# Altium footprint library FootPrintLib_10.PcbLib: 270 footprints (part 10 of 17)
Each footprint in its own frame and in the unit in brackets; x right, y up, seen from the top. Pads: shape width x height; smd on the part's side, far side on the other; paste and mask are expansions set on the pad; w line width, h text height; cw(c..) or ccw(c..) is an arc to the next point about the centre after c.
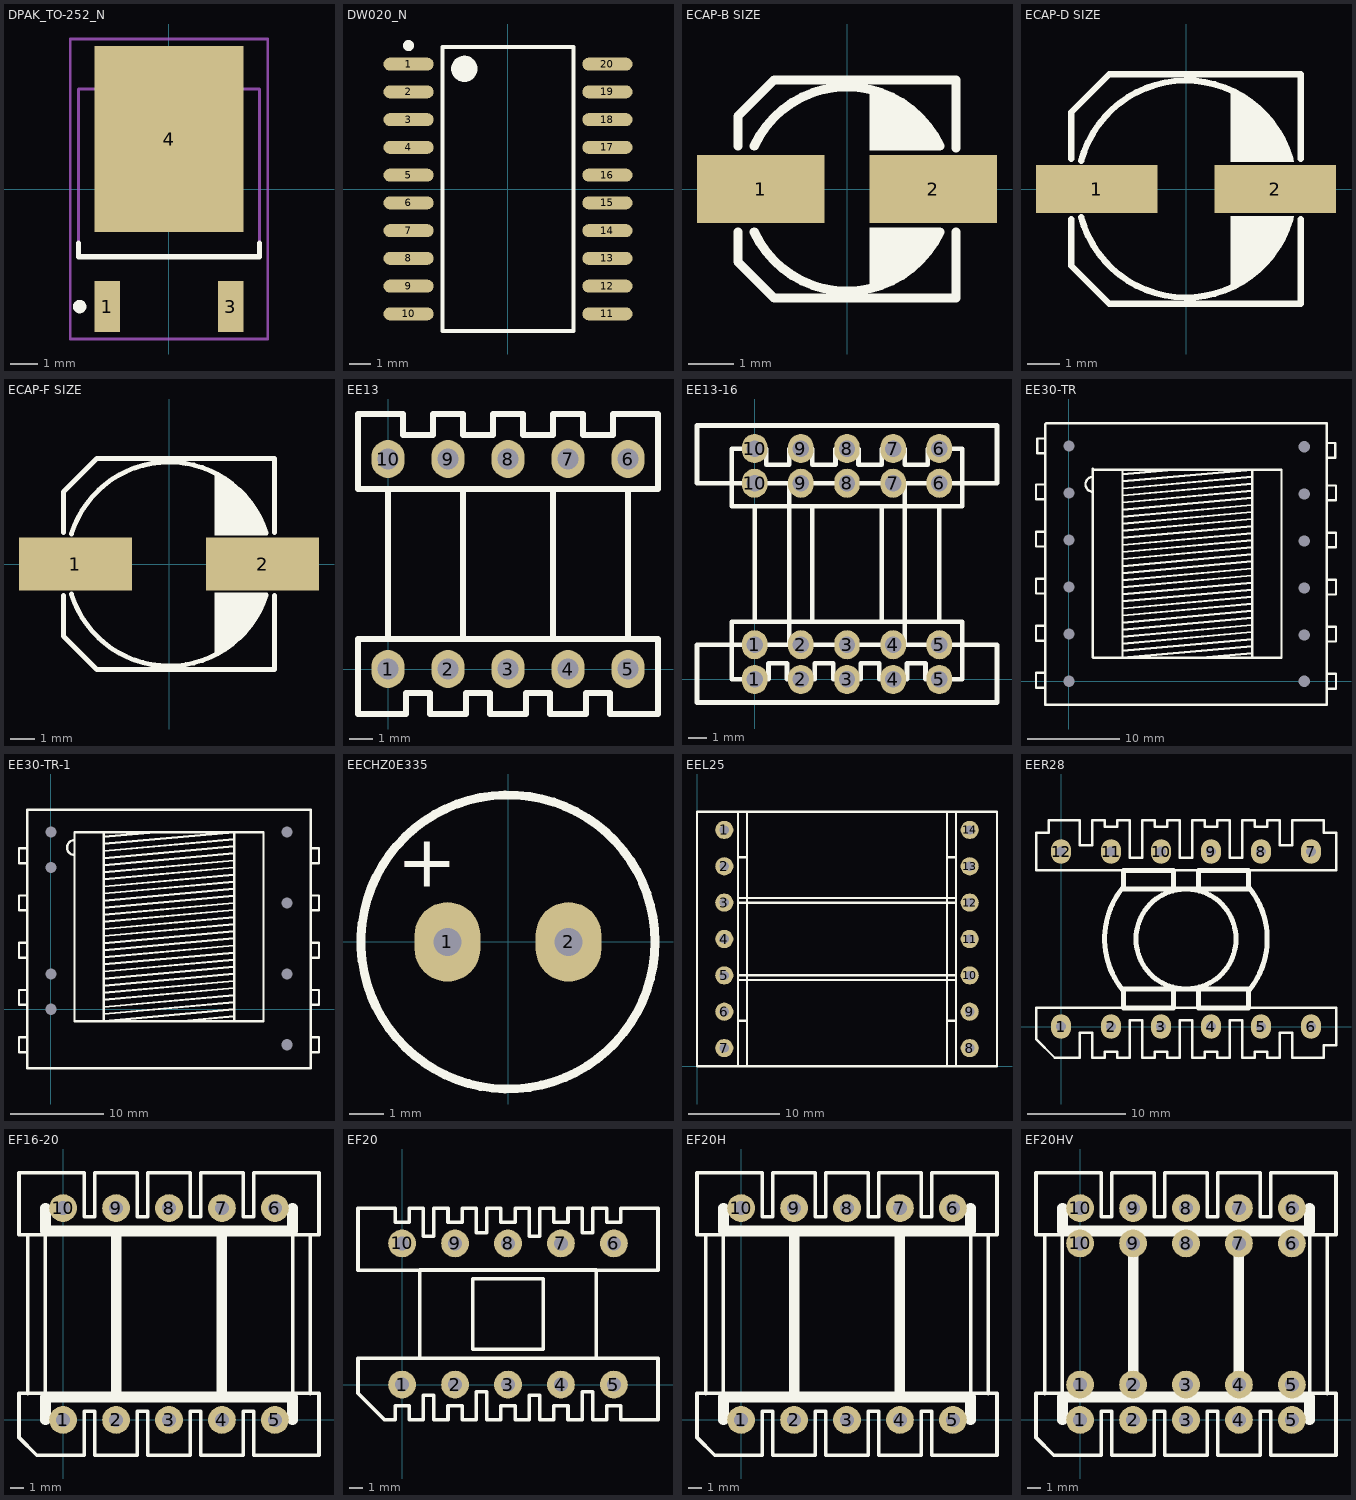
[diagram p9: the footprints below, top view; thin cyan lines are the x and y axes]

## DPAK_TO-252_N [mm] "D-PAK, 4-Leads, Body 6.1x6.6mm, Pitch 2.29mm, Lead Span 9.7mm, IPC Medium Density"
height 2.38
pads (3):
  rect 0.95x1.9 smd: 1(-2.28,-4.35) 3(2.28,-4.35)
  rect 5.5x6.9 smd: 4(0,1.85)
Top Overlay:
  circle w0.25: c-3.305,-4.35 r0.125
  lines w0.2: -3.35,-2 -3.35,-2.5 3.35,-2.5 3.35,-2
Mechanical 13:
  lines w0.1: -3.35,-2.5 -3.35,3.7 3.35,3.7 3.35,-2.5 -3.35,-2.5
Mechanical 15:
  lines w0.1: -0.5,0 0.5,0 ; 0,-0.5 0,0.5 ; -3.65,-5.55 -3.65,5.55 3.65,5.55 3.65,-5.55 -3.65,-5.55
3D body "DPAK.STEP": height 2.34, standoff -0.07, extent -3.27,-5.176 3.27,4.763

## DW020_N [mm] "SOIC, 20-Leads, Body 12.8x7.5mm, Pitch 1.27mm, IPC Medium Density"
height 2.65
pads (20):
  oval 2.3x0.6 smd: 1(-4.55,5.715) 2(-4.55,4.445) 3(-4.55,3.175) 4(-4.55,1.905) 5(-4.55,0.635) 6(-4.55,-0.635) 7(-4.55,-1.905) 8(-4.55,-3.175) 9(-4.55,-4.445) 10(-4.55,-5.715) 11(4.55,-5.715) 12(4.55,-4.445) 13(4.55,-3.175) 14(4.55,-1.905) 15(4.55,-0.635) 16(4.55,0.635) 17(4.55,1.905) 18(4.55,3.175) 19(4.55,4.445) 20(4.55,5.715)
Top Overlay:
  circle w0.25: c-4.55,6.565 r0.125
  circle w0.6: c-2,5.5 r0.3
  lines w0.2: -3,-6.5 -3,6.5 3,6.5 3,-6.5 -3,-6.5

## ECAP-B SIZE [mm] "Footprint For Panasonic Co."
pads (2):
  rect 2.8x1.5 smd mask+0.1: 1(-1.9,0) 2(1.9,0)
Top Overlay:
  region: 2.05,-0.85 2.05,-1.05 1.1,-2 0.5,-2.25 0.5,-0.85
  region: 2.05,0.85 2.05,1.05 1.1,2 0.5,2.25 0.5,0.85
  lines w0.2: -2.4,-0.95 -2.4,-1.6 -1.6,-2.4 2.4,-2.4 2.4,-0.95 ; -2.4,0.95 -2.4,1.6 -1.6,2.4 2.4,2.4 2.4,0.9 ; -2.04,-0.949 ccw(c0,0) 2.04,-0.949 ; -2.04,0.949 cw(c0,0) 2.04,0.949
3D body "ea-B.STEP": height 5.41, standoff -0.01, extent -2.286,-2.15 2.314,2.15

## ECAP-D SIZE [mm] "Footprint For Panasonic Co."
pads (2):
  rect 3.8x1.5 smd mask+0.1: 1(-2.8,0) 2(2.8,0)
Top Overlay:
  region: 3.38,0.85 3.35,1 2.11,2.78 1.4,3.11 1.4,0.85
  region: 3.38,-0.85 3.35,-1 2.11,-2.78 1.4,-3.11 1.4,-0.85
  lines w0.2: -3.6,-0.95 -3.6,-2.4 -2.4,-3.6 3.6,-3.6 3.6,-0.95 ; -3.6,0.95 -3.6,2.4 -2.4,3.6 3.6,3.6 3.6,0.95 ; -3.284,-0.88 ccw(c0,0) 3.267,-0.941 ; -3.284,0.88 cw(c0,0) 3.267,0.941
3D body "ea-D.STEP": height 5.41, standoff -0.01, extent -3.514,-3.259 3.486,3.341

## ECAP-F SIZE [mm] "Footprint For Panasonic Co."
height 10.2
pads (2):
  rect 4.7x2.2 smd mask+0.1: 1(-3.9,0) 2(3.9,0)
Top Overlay:
  region: 4.1,1.2 4.1,1.3 2.91,3.18 1.9,3.8 1.9,1.2
  region: 4.1,-1.2 4.1,-1.3 2.91,-3.18 1.9,-3.8 1.9,-1.2
  lines w0.2: -4.4,-1.3 -4.4,-3 -3,-4.4 4.4,-4.4 4.4,-1.3 ; -4.4,1.3 -4.4,3 -3,4.4 ; -4.064,-1.243 ccw(c0,0) 4.051,-1.285 ; -4.064,1.243 cw(c0,0) 4.051,1.285 ; 4.4,1.3 4.4,4.4 -3,4.4 ; -3,4.4 -3,4.4
3D body "EA-F.STEP": height 10.21, standoff -0.01, extent -4.95,-4.109 4.95,4.191

## EE13 [mm]
pads (10):
  oval 1.4x1.6 hole 0.9: 1(0,0) 2(2.54,0) 3(5.08,0) 4(7.62,0) 5(10.16,0) 6(10.16,8.89) 7(7.62,8.89) 8(5.08,8.89) 9(2.54,8.89) 10(0,8.89)
Top Overlay:
  lines w0.254: 0,1.27 0,7.62 ; 3.175,1.27 3.175,7.62 ; 6.985,1.27 6.985,7.62 ; 10.16,1.27 10.16,7.62 ; -1.27,-1.905 -1.27,1.27 11.43,1.27 11.43,-1.905 9.398,-1.905 9.398,-1.016 8.382,-1.016 8.382,-1.905 6.858,-1.905 6.858,-1.016 5.842,-1.016 5.842,-1.905 4.318,-1.905 4.318,-1.016 3.302,-1.016 3.302,-1.905 1.778,-1.905 1.778,-1.016 0.762,-1.016 0.762,-1.905 -1.27,-1.905 ; -1.27,7.62 11.43,7.62 11.43,10.795 9.525,10.795 9.525,9.906 8.255,9.906 8.255,10.795 6.985,10.795 6.985,9.906 5.715,9.906 5.715,10.795 4.445,10.795 4.445,9.906 3.175,9.906 3.175,10.795 1.905,10.795 1.905,9.906 0.635,9.906 0.635,10.795 -1.27,10.795 -1.27,7.62

## EE13-16 [mm]
pads (20):
  oval 1.4x1.6 hole 0.9: 1(0,0) 1(0,1.905) 2(2.54,0) 2(2.54,1.905) 3(5.08,0) 3(5.08,1.905) 4(7.62,0) 4(7.62,1.905) 5(10.16,0) 5(10.16,1.905) 6(10.16,10.795) 6(10.16,12.7) 7(7.62,10.795) 7(7.62,12.7) 8(5.08,10.795) 8(5.08,12.7) 9(2.54,10.795) 9(2.54,12.7) 10(0,10.795) 10(0,12.7)
Top Overlay:
  lines w0.254: 0,3.175 0,9.525 ; 1.905,1.905 1.905,10.795 ; 3.175,3.175 3.175,9.525 ; 6.985,3.175 6.985,9.525 ; 8.255,1.905 8.255,10.795 ; 10.16,3.175 10.16,9.525 ; -3.175,-1.27 -3.175,1.905 13.335,1.905 13.335,-1.27 -3.175,-1.27 ; -3.175,10.795 -3.175,13.97 13.335,13.97 13.335,10.795 -3.175,10.795 ; -1.27,0 0.762,0 0.762,0.889 1.778,0.889 1.778,0 3.302,0 3.302,0.889 4.318,0.889 4.318,0 5.842,0 5.842,0.889 6.858,0.889 6.858,0 8.382,0 8.382,0.889 9.398,0.889 9.398,0 11.43,0 11.43,3.175 -1.27,3.175 -1.27,0 ; -1.27,9.525 -1.27,12.7 0.635,12.7 0.635,11.811 1.905,11.811 1.905,12.7 3.175,12.7 3.175,11.811 4.445,11.811 4.445,12.7 5.715,12.7 5.715,11.811 6.985,11.811 6.985,12.7 8.255,12.7 8.255,11.811 9.525,11.811 9.525,12.7 11.43,12.7 11.43,9.525 -1.27,9.525

## EE30-TR [mm] "PDL-851 Trance"
height 22.5
pads (12):
  round 0 / inner round 0 / far side oval 3.2x2.7 hole 1.2: 1(25.4,25.298) 2(25.4,20.218) 3(25.4,15.138) 4(25.4,10.058) 5(25.4,4.978) 6(25.4,0) 7(0,0) 8(0,5.08) 9(0,10.16) 10(0,15.24) 11(0,20.32) 12(0,25.4)
Top Overlay:
  lines w0.254: -2.667,-0.698 -3.552,-0.698 -3.552,0.902 -2.667,0.902 ; -2.667,4.382 -3.552,4.382 -3.552,5.982 -2.667,5.982 ; -2.667,9.462 -3.552,9.462 -3.552,11.062 -2.667,11.062 ; -2.667,14.542 -3.552,14.542 -3.552,16.142 -2.667,16.142 ; -2.667,19.622 -3.552,19.622 -3.552,21.222 -2.667,21.222 ; -2.54,24.6 -3.425,24.6 -3.425,26.2 -2.54,26.2 ; 2.591,2.591 2.591,22.911 ; 2.591,20.451 cw(c2.591,21.251) 2.591,22.051 ; 2.616,2.515 22.936,2.515 22.936,22.835 2.616,22.835 ; 5.776,3.277 19.776,4.547 ; 5.776,4.039 19.776,5.309 ; 5.776,4.801 19.776,6.071 ; 5.776,5.563 19.776,6.833 ; 5.776,6.325 19.776,7.595 ; 5.776,7.087 19.776,8.357 ; 5.776,7.849 19.776,9.119 ; 5.776,8.611 19.776,9.881 ; 5.776,9.373 19.776,10.643 ; 5.776,10.135 19.776,11.405 ; 5.776,10.897 19.776,12.167 ; 5.776,11.659 19.776,12.929 ; 5.776,12.421 19.776,13.691 ; 5.776,13.183 19.776,14.453 ; 5.776,13.945 19.776,15.215 ; 5.776,14.707 19.776,15.977 ; 5.776,15.469 19.776,16.739 ; 5.776,16.231 19.776,17.501 ; 5.776,16.993 19.776,18.263 ; 5.776,17.755 19.776,19.025 ; 5.776,18.517 19.776,19.787 ; 5.776,19.279 19.776,20.549 ; 5.776,20.041 19.776,21.311 ; 5.776,20.803 19.776,22.073 ; 5.776,21.565 19.776,22.835 19.776,2.515 ; 5.776,22.327 11.265,22.825 ; 5.776,22.835 5.776,2.515 19.776,3.785 ; 14.287,2.525 19.776,3.023 ; 27.864,24.105 28.749,24.105 28.749,25.705 27.864,25.705 ; 27.94,-0.8 28.825,-0.8 28.825,0.8 27.94,0.8 ; 27.94,4.28 28.825,4.28 28.825,5.88 27.94,5.88 ; 27.94,9.36 28.825,9.36 28.825,10.96 27.94,10.96 ; 27.94,14.44 28.825,14.44 28.825,16.04 27.94,16.04 ; 27.94,19.52 28.825,19.52 28.825,21.12 27.94,21.12 ; -2.54,-2.54 27.838,-2.54 27.838,27.838 -2.464,27.838 -2.54,27.762 -2.54,-2.54

## EE30-TR-1 [mm] "PDL-851 Trance"
height 22.5
pads (8):
  round 0 / inner round 0 / far side oval 3.2x2.7 hole 1.2: 1(25.4,-3.81) 2(25.4,3.81) 3(25.4,11.43) 4(25.4,19.05) 5(0,15.24) 5(0,19.05) 6(0,0) 6(0,3.81)
Top Overlay:
  lines w0.254: -2.54,-4.61 -3.425,-4.61 -3.425,-3.01 -2.54,-3.01 ; -2.54,0.47 -3.425,0.47 -3.425,2.07 -2.54,2.07 ; -2.54,5.55 -3.425,5.55 -3.425,7.15 -2.54,7.15 ; -2.54,10.63 -3.425,10.63 -3.425,12.23 -2.54,12.23 ; -2.54,15.71 -3.425,15.71 -3.425,17.31 -2.54,17.31 ; 2.54,16.59 cw(c2.54,17.39) 2.54,18.19 ; 5.7,-0.508 19.7,0.762 ; 5.7,0.254 19.7,1.524 ; 5.7,1.016 19.7,2.286 ; 5.7,1.778 19.7,3.048 ; 5.7,2.54 19.7,3.81 ; 5.7,3.302 19.7,4.572 ; 5.7,4.064 19.7,5.334 ; 5.7,4.826 19.7,6.096 ; 5.7,5.588 19.7,6.858 ; 5.7,6.35 19.7,7.62 ; 5.7,7.112 19.7,8.382 ; 5.7,7.874 19.7,9.144 ; 5.7,8.636 19.7,9.906 ; 5.7,9.398 19.7,10.668 ; 5.7,10.16 19.7,11.43 ; 5.7,10.922 19.7,12.192 ; 5.7,11.684 19.7,12.954 ; 5.7,12.446 19.7,13.716 ; 5.7,13.208 19.7,14.478 ; 5.7,13.97 19.7,15.24 ; 5.7,14.732 19.7,16.002 ; 5.7,15.494 19.7,16.764 ; 5.7,16.256 19.7,17.526 ; 5.7,17.018 19.7,18.288 ; 5.7,17.78 19.7,19.05 19.7,-1.27 ; 5.7,18.542 11.189,19.04 ; 5.7,19.05 5.7,-1.27 19.7,0 ; 14.211,-1.26 19.7,-0.762 ; 27.94,-4.61 28.825,-4.61 28.825,-3.01 27.94,-3.01 ; 27.94,0.47 28.825,0.47 28.825,2.07 27.94,2.07 ; 27.94,5.55 28.825,5.55 28.825,7.15 27.94,7.15 ; 27.94,10.63 28.825,10.63 28.825,12.23 27.94,12.23 ; 27.94,15.71 28.825,15.71 28.825,17.31 27.94,17.31 ; -2.54,-6.35 -2.54,21.463 27.94,21.463 27.94,-6.35 -2.54,-6.35 ; 2.54,-1.27 22.86,-1.27 22.86,19.05 2.54,19.05 2.54,-1.27

## EECHZ0E335 [mm] "Electric Double Layer Capacitors (Gold Capacitor)/ HZ"
height 22
pads (2):
  oval 1.9x2.3 hole 0.8: 1(-1.75,0) 2(1.75,0)
Top Overlay:
  circle w0.254: c0,0 r4.25
  text "+" at -1.473,2.896 h1.52
3D body "User Library-Capacitor Radial ElectroliticCAPPR250-630X500.STEP": height 5.01, standoff -2.7, extent -3.15,-3.15 3.133,3.15

## EEL25 [mm]
pads (14):
  round 2 hole 1: 1(3,26) 2(3,22) 3(3,18) 4(3,14) 5(3,10) 6(3,6) 7(3,2) 8(30,2) 9(30,6) 10(30,10) 11(30,14) 12(30,18) 13(30,22) 14(30,26)
Top Overlay:
  lines w0.254: 4.5,5 5.5,5 ; 4.5,9.5 28.5,9.5 ; 4.5,10 28.5,10 ; 4.5,18 28.5,18 ; 4.5,18.5 28.5,18.5 ; 4.5,23 5.5,23 ; 4.5,28 4.5,0 5.5,0 5.5,28 ; 27.5,5 28.5,5 ; 27.5,23 28.5,23 ; 27.5,28 27.5,0 28.5,0 28.5,28 ; 0,0 33,0 33,28 0,28 0,0

## EER28 [mm]
pads (12):
  oval 2x2.5 hole 1: 1(0,0) 2(5.08,0) 3(10.16,0) 4(15.24,0) 5(20.32,0) 6(25.4,0) 7(25.4,17.78) 8(20.32,17.78) 9(15.24,17.78) 10(10.16,17.78) 11(5.08,17.78) 12(0,17.78)
Top Overlay:
  circle w0.508: c12.7,8.89 r5.08
  lines w0.254: 26.67,-3.175 26.67,-1.905 ; 26.67,-3.175 23.495,-3.175 23.495,-0.635 22.225,-0.635 22.225,-3.175 20.955,-3.175 20.955,-2.54 19.685,-2.54 19.685,-3.175 18.415,-3.175 18.415,0.635 17.145,0.635 17.145,-3.175 15.875,-3.175 15.875,-2.54 14.605,-2.54 14.605,-3.175 13.335,-3.175 13.335,0.635 12.065,0.635 12.065,-3.175 10.795,-3.175 10.795,-2.54 9.525,-2.54 9.525,-3.175 8.255,-3.175 8.255,0.635 6.985,0.635 6.985,-3.175 5.715,-3.175 5.715,-2.54 4.445,-2.54 4.445,-3.175 3.175,-3.175 3.175,-0.635 1.905,-0.635 1.905,-3.175 -0.635,-3.175 -2.54,-1.27 -2.54,1.905 27.94,1.905 27.94,-1.905 26.67,-1.905 ; 26.67,-3.175 26.67,-1.905 ; -2.54,15.875 -2.54,19.685 -1.27,19.685 -1.27,20.955 1.905,20.955 1.905,18.415 3.175,18.415 3.175,20.955 4.445,20.955 4.445,20.32 5.715,20.32 5.715,20.955 6.985,20.955 6.985,17.145 8.255,17.145 8.255,20.955 9.525,20.955 9.525,20.32 10.795,20.32 10.795,20.955 12.065,20.955 12.065,17.145 13.335,17.145 13.335,20.955 14.605,20.955 14.605,20.32 15.875,20.32 15.875,20.955 17.145,20.955 17.145,17.145 18.415,17.145 18.415,20.955 19.685,20.955 19.685,20.32 20.955,20.32 20.955,20.955 22.225,20.955 22.225,18.415 23.495,18.415 23.495,20.955 26.67,20.955 26.67,19.685 27.94,19.685 27.94,15.875 -2.54,15.875
  lines w0.508: 6.236,14.061 ccw(c12.687,8.911) 6.256,3.735 ; 11.43,3.81 11.43,1.905 6.35,1.905 6.35,3.81 19.05,3.81 19.05,1.905 13.97,1.905 13.97,3.81 ; 11.43,13.97 11.43,15.875 6.35,15.875 6.35,13.97 19.05,13.97 19.05,15.875 13.97,15.875 13.97,13.97 ; 19.146,3.733 ccw(c12.7,8.89) 19.146,14.047

## EF16-20 [mm]
pads (10):
  round 2 hole 1: 1(0,0) 2(3.81,0) 3(7.62,0) 4(11.43,0) 5(15.24,0) 6(15.24,15.24) 7(11.43,15.24) 8(7.62,15.24) 9(3.81,15.24) 10(0,15.24)
Top Overlay:
  lines w0.254: -2.54,1.88 -2.54,13.31 ; -1.27,1.905 -1.27,13.614 ; 16.51,1.905 16.51,13.614 ; 17.78,1.88 17.78,13.31 ; -3.175,-1.27 -3.175,1.905 18.415,1.905 18.415,-2.54 13.716,-2.54 13.716,0.635 12.954,0.635 12.954,-2.54 9.906,-2.54 9.906,0.635 9.144,0.635 9.144,-2.54 6.096,-2.54 6.096,0.635 5.334,0.635 5.334,-2.54 2.286,-2.54 2.286,0.635 1.524,0.635 1.524,-2.54 -1.905,-2.54 -3.175,-1.27 ; -3.175,13.31 18.415,13.31 18.415,17.78 13.716,17.78 13.716,14.605 12.954,14.605 12.954,17.78 9.906,17.78 9.906,14.605 9.144,14.605 9.144,17.78 6.096,17.78 6.096,14.605 5.334,14.605 5.334,17.78 2.286,17.78 2.286,14.605 1.524,14.605 1.524,17.78 -3.175,17.78 -3.175,13.31
  lines w0.762: -1.27,0 -1.27,1.626 16.51,1.626 16.51,0 ; -1.27,15.24 -1.27,13.614 16.51,13.614 16.51,15.24 ; 3.81,1.93 3.81,13.335 ; 11.43,1.88 11.43,13.31

## EF20 [mm]
pads (10):
  round 2 hole 1: 1(0,0) 2(3.81,0) 3(7.62,0) 4(11.43,0) 5(15.24,0) 6(15.24,10.16) 7(11.43,10.16) 8(7.62,10.16) 9(3.81,10.16) 10(0,10.16)
Top Overlay:
  lines w0.254: -3.175,-0.635 -1.27,-2.54 -0.508,-2.54 -0.508,-1.524 0.508,-1.524 0.508,-2.54 1.524,-2.54 1.524,-0.762 2.286,-0.762 2.286,-2.54 3.302,-2.54 3.302,-1.524 4.318,-1.524 4.318,-2.54 5.334,-2.54 5.334,-0.508 6.096,-0.508 6.096,-2.54 7.112,-2.54 7.112,-1.524 8.128,-1.524 8.128,-2.54 9.144,-2.54 9.144,-0.762 9.906,-0.762 9.906,-2.54 10.922,-2.54 10.922,-1.524 11.938,-1.524 11.938,-2.54 12.954,-2.54 12.954,-0.508 13.716,-0.508 13.716,-2.54 14.732,-2.54 14.732,-1.524 15.748,-1.524 15.748,-2.54 18.415,-2.54 18.415,1.905 -3.175,1.905 -3.175,-0.635 ; -3.175,8.23 -3.175,12.7 -0.508,12.7 -0.508,11.684 0.508,11.684 0.508,12.7 1.524,12.7 1.524,10.668 2.286,10.668 2.286,12.7 3.302,12.7 3.302,11.684 4.318,11.684 4.318,12.7 5.334,12.7 5.334,10.922 6.096,10.922 6.096,12.7 7.112,12.7 7.112,11.684 8.128,11.684 8.128,12.7 9.144,12.7 9.144,10.668 9.906,10.668 9.906,12.7 10.922,12.7 10.922,11.684 11.938,11.684 11.938,12.7 12.954,12.7 12.954,10.922 13.716,10.922 13.716,12.7 14.732,12.7 14.732,11.684 15.748,11.684 15.748,12.7 18.415,12.7 18.415,8.23 -3.175,8.23 ; 1.27,1.905 13.97,1.905 13.97,8.255 1.27,8.255 1.27,1.905 ; 5.08,2.54 5.08,7.62 10.16,7.62 10.16,2.54 5.08,2.54

## EF20H [mm]
pads (10):
  round 2 hole 1: 1(0,0) 2(3.81,0) 3(7.62,0) 4(11.43,0) 5(15.24,0) 6(15.24,15.24) 7(11.43,15.24) 8(7.62,15.24) 9(3.81,15.24) 10(0,15.24)
Top Overlay:
  lines w0.254: -2.54,1.88 -2.54,13.31 ; -1.27,1.905 -1.27,13.614 ; 16.51,1.905 16.51,13.614 ; 17.78,1.88 17.78,13.31 ; -3.175,-1.27 -1.905,-2.54 1.524,-2.54 1.524,0.635 2.286,0.635 2.286,-2.54 5.334,-2.54 5.334,0.635 6.096,0.635 6.096,-2.54 9.144,-2.54 9.144,0.635 9.906,0.635 9.906,-2.54 12.954,-2.54 12.954,0.635 13.716,0.635 13.716,-2.54 18.415,-2.54 18.415,1.905 -3.175,1.905 -3.175,-1.27 ; -3.175,13.31 -3.175,17.78 1.524,17.78 1.524,14.605 2.286,14.605 2.286,17.78 5.334,17.78 5.334,14.605 6.096,14.605 6.096,17.78 9.144,17.78 9.144,14.605 9.906,14.605 9.906,17.78 12.954,17.78 12.954,14.605 13.716,14.605 13.716,17.78 18.415,17.78 18.415,13.31 -3.175,13.31
  lines w0.762: -1.27,0 -1.27,1.626 16.51,1.626 16.51,0 ; -1.27,15.24 -1.27,13.614 16.51,13.614 16.51,15.24 ; 3.81,1.93 3.81,13.335 ; 11.43,1.88 11.43,13.31

## EF20HV [mm]
pads (20):
  round 2 hole 1: 1(0,0) 1(0,2.54) 2(3.81,0) 2(3.81,2.54) 3(7.62,0) 3(7.62,2.54) 4(11.43,0) 4(11.43,2.54) 5(15.24,0) 5(15.24,2.54) 6(15.24,12.7) 6(15.24,15.24) 7(11.43,12.7) 7(11.43,15.24) 8(7.62,12.7) 8(7.62,15.24) 9(3.81,12.7) 9(3.81,15.24) 10(0,12.7) 10(0,15.24)
Top Overlay:
  lines w0.254: -2.54,1.88 -2.54,13.31 ; -1.27,1.905 -1.27,13.614 ; 16.51,1.905 16.51,13.614 ; 17.78,1.88 17.78,13.31 ; -3.175,-1.27 -1.905,-2.54 1.524,-2.54 1.524,0.635 2.286,0.635 2.286,-2.54 5.334,-2.54 5.334,0.635 6.096,0.635 6.096,-2.54 9.144,-2.54 9.144,0.635 9.906,0.635 9.906,-2.54 12.954,-2.54 12.954,0.635 13.716,0.635 13.716,-2.54 18.415,-2.54 18.415,1.905 -3.175,1.905 -3.175,-1.27 ; -3.175,13.31 -3.175,17.78 1.524,17.78 1.524,14.605 2.286,14.605 2.286,17.78 5.334,17.78 5.334,14.605 6.096,14.605 6.096,17.78 9.144,17.78 9.144,14.605 9.906,14.605 9.906,17.78 12.954,17.78 12.954,14.605 13.716,14.605 13.716,17.78 18.415,17.78 18.415,13.31 -3.175,13.31
  lines w0.762: -1.27,0 -1.27,1.626 16.51,1.626 16.51,0 ; -1.27,15.24 -1.27,13.614 16.51,13.614 16.51,15.24 ; 3.81,1.93 3.81,13.335 ; 11.43,1.88 11.43,13.31